# Altium schematic symbol library NANOSMDC016F-2.SchLib: 1 symbol
Pins are listed as number, name and electrical type; pins without a type are passive.

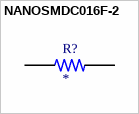
[diagram p0: symbol NANOSMDC016F-2]

## NANOSMDC016F-2
designator R?
PTC RESETTABLE FUSE, 48VDC, 1206; Thermistor Mounting:SMD; Product Range:PolySwitch nanoSMDC Series; Holding Current:160mA; Tripping Current:450mA; Voltage Rating:48VDC; Operating Temperature Min:-40Â°C; Operating Tempera; MF: Littelfuse, Inc.; MP: NANOSMDC016F-2; SnapEDA_Link: https://www.snapeda.com/parts/NANOSMDC016F-2/Littelfuse/view-part/?ref=snap; Package: 1206 Littelfuse; Value: *; Check_prices: https://www.snapeda.com/parts/NANOSMDC016F-2/Littelfuse/view-part/?ref=eda
footprint RESC3115X65N
pins: 1, 2